# Altium integrated library Aluminium SMD 35V 8x10.5.IntLib: 1 symbol
Pins are listed as number, name and electrical type; pins without a type are passive.

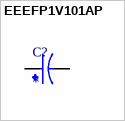
[diagram p0: symbol EEEFP1V101AP]

## EEEFP1V101AP
designator C?
100ÂµF 35V Aluminum Electrolytic Capacitors Radial, Can - SMD 80mOhm @ 100kHz 2000 Hrs @ 105Â°C; MF: Panasonic Electronic; MP: EEE-FP1V101AP; SnapEDA_Link: https://www.snapeda.com/parts/EEE-FP1V101AP/Panasonic/view-part/?ref=snap; Package: RADIAL-2 Panasonic; Value: *; Check_prices: https://www.snapeda.com/parts/EEE-FP1V101AP/Panasonic/view-part/?ref=eda
footprint CAP_EEEFP1V101AP
pins: 1, 2